# EAGLE library part VL53L9CX (library VL53L9CX)
High-Performance 2.3K-Zone 3D All-in-One LiDAR dToF Sensor, -30C to +70C, 12.8 x 6.1 x 4.6 mm, 1.2 V & 3.3 V, Up to 100 Hz frame rate, 3D room mapping (multizone and multiobject detection), Dual camera stereoscopy assistance thanks to 2D and depth multizone distance measurement at 60 fps Source: Datasheet <https://www.st.com/resource/en/datasheet/vl53l9cx.pdf>
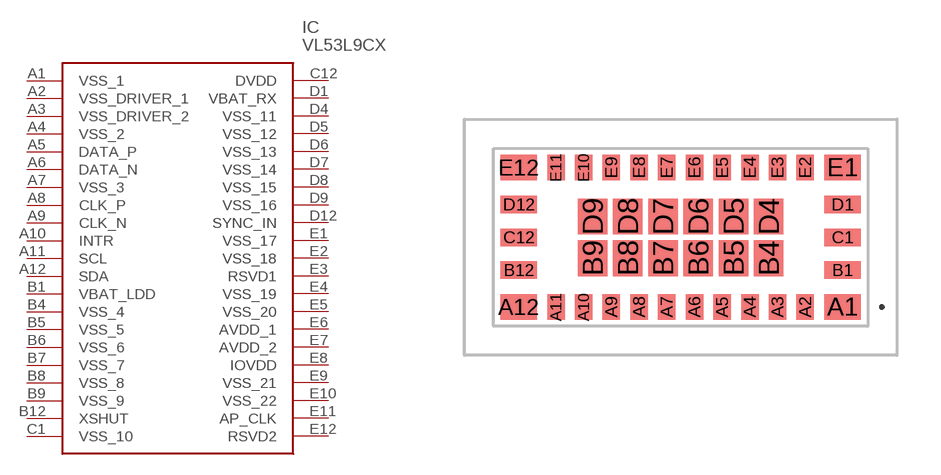
[diagram p0: symbol with the pads of VL53L9CX; footprint VL53L9CX]

Designator prefix IC

## VL53L9CX (Description: High-Performance 2.3K-Zone 3D All-in-One LiDAR dToF Sensor, -30C to +70C, 12.8 x 6.1 x 4.6 mm, 1.2 V & 3.3 V, Up to 100 Hz frame rate, 3D room mapping (multizone and multiobject detection), Dual camera stereoscopy assistance thanks to 2D and depth multizone distance measurement at 60 fps; Height: 4.7mm; Manufacturer_Name: STMicroelectronics; Manufacturer_Part_Number: VL53L9CX)  [VL53L9CX]
A1  VSS_1
A2  VSS_DRIVER_1
A3  VSS_DRIVER_2
A4  VSS_2
A5  DATA_P
A6  DATA_N
A7  VSS_3
A8  CLK_P
A9  CLK_N
A10  INTR
A11  SCL
A12  SDA
B1  VBAT_LDD
B4  VSS_4
B5  VSS_5
B6  VSS_6
B7  VSS_7
B8  VSS_8
B9  VSS_9
B12  XSHUT
C1  VSS_10
C12  DVDD
D1  VBAT_RX
D4  VSS_11
D5  VSS_12
D6  VSS_13
D7  VSS_14
D8  VSS_15
D9  VSS_16
D12  SYNC_IN
E1  VSS_17
E2  VSS_18
E3  RSVD1
E4  VSS_19
E5  VSS_20
E6  AVDD_1
E7  AVDD_2
E8  IOVDD
E9  VSS_21
E10  VSS_22
E11  AP_CLK
E12  RSVD2

## Footprint VL53L9CX (pad centres in mm)
VL53L9CX-2
smd 1.255 x 0.88: A1 5.553,-2.39; A12 -5.553,-2.39; E1 5.553,2.39; E12 -5.553,2.39
smd 0.6 x 0.88: A2 4.275,-2.39; A3 3.325,-2.39; A4 2.375,-2.39; A5 1.425,-2.39; A6 0.475,-2.39; A7 -0.475,-2.39; A8 -1.425,-2.39; A9 -2.375,-2.39; A10 -3.325,-2.39; A11 -4.275,-2.39; E2 4.275,2.39; E3 3.325,2.39; E4 2.375,2.39; E5 1.425,2.39; E6 0.475,2.39; E7 -0.475,2.39; E8 -1.425,2.39; E9 -2.375,2.39; E10 -3.325,2.39; E11 -4.275,2.39
smd 1.255 x 0.6: B1 5.553,-1.125; B12 -5.553,-1.125; C1 5.553,0; C12 -5.553,0; D1 5.553,1.125; D12 -5.553,1.125
smd 1.008 x 1.225: B4 3.02,-0.713; B5 1.812,-0.713; B6 0.604,-0.713; B7 -0.604,-0.713; B8 -1.812,-0.713; B9 -3.02,-0.713; D4 3.02,0.713; D5 1.812,0.713; D6 0.604,0.713; D7 -0.604,0.713; D8 -1.812,0.713; D9 -3.02,0.713